# Altium footprint library Connectors.PcbLib: 113 footprints (part 6 of 8)
Each footprint in its own frame and in the unit in brackets; x right, y up, seen from the top. Pads: shape width x height; smd on the part's side, far side on the other; paste and mask are expansions set on the pad; w line width, h text height; cw(c..) or ccw(c..) is an arc to the next point about the centre after c.
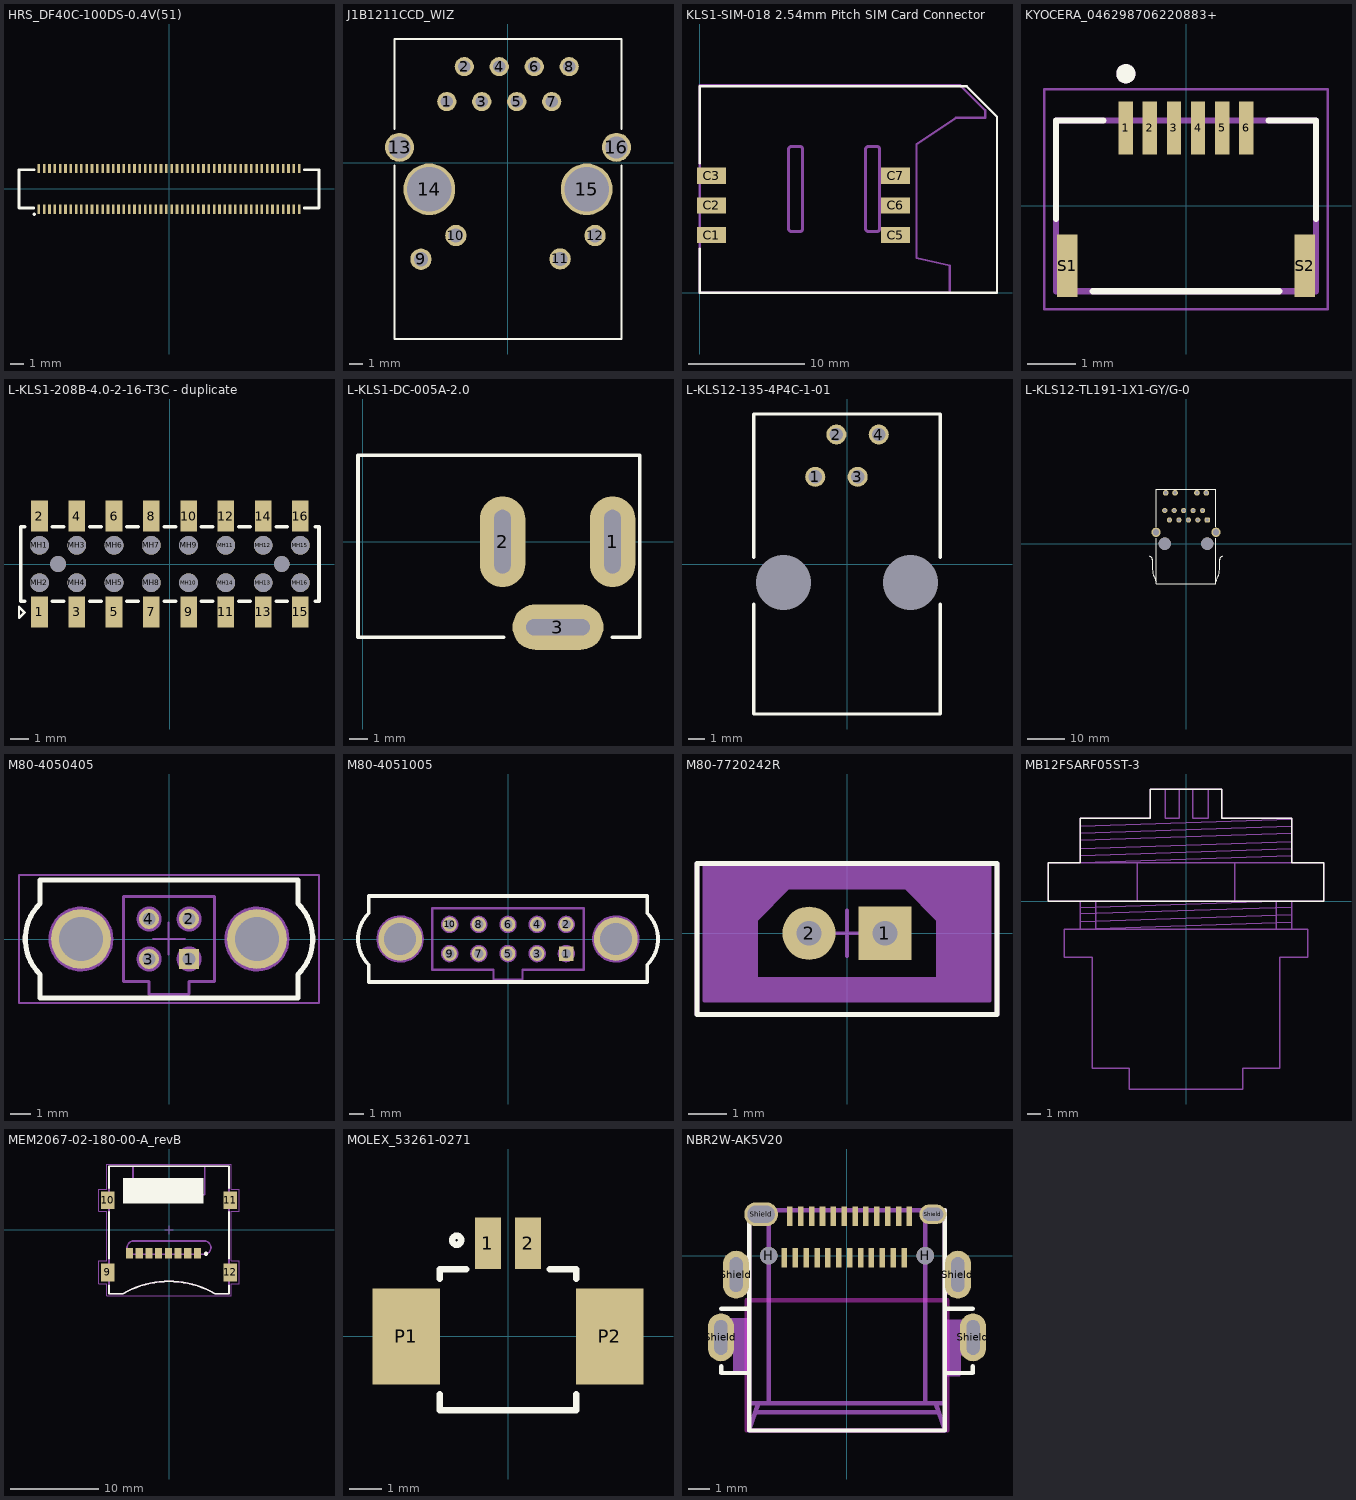
[diagram p5: the footprints below, top view; thin cyan lines are the x and y axes]

## HRS_DF40C-100DS-0.4V(51) [mm]
pads (100):
  rect 0.2x0.7 smd: 1(-9.8,-1.54) 2(-9.8,1.54) 3(-9.4,-1.54) 4(-9.4,1.54) 5(-9,-1.54) 6(-9,1.54) 7(-8.6,-1.54) 8(-8.6,1.54) 9(-8.2,-1.54) 10(-8.2,1.54) 11(-7.8,-1.54) 12(-7.8,1.54) 13(-7.4,-1.54) 14(-7.4,1.54) 15(-7,-1.54) 16(-7,1.54) 17(-6.6,-1.54) 18(-6.6,1.54) 19(-6.2,-1.54) 20(-6.2,1.54) 21(-5.8,-1.54) 22(-5.8,1.54) 23(-5.4,-1.54) 24(-5.4,1.54) 25(-5,-1.54) 26(-5,1.54) 27(-4.6,-1.54) 28(-4.6,1.54) 29(-4.2,-1.54) 30(-4.2,1.54) 31(-3.8,-1.54) 32(-3.8,1.54) 33(-3.4,-1.54) 34(-3.4,1.54) 35(-3,-1.54) 36(-3,1.54) 37(-2.6,-1.54) 38(-2.6,1.54) 39(-2.2,-1.54) 40(-2.2,1.54) 41(-1.8,-1.54) 42(-1.8,1.54) 43(-1.4,-1.54) 44(-1.4,1.54) 45(-1,-1.54) 46(-1,1.54) 47(-0.6,-1.54) 48(-0.6,1.54) 49(-0.2,-1.54) 50(-0.2,1.54) 51(0.2,-1.54) 52(0.2,1.54) 53(0.6,-1.54) 54(0.6,1.54) 55(1,-1.54) 56(1,1.54) 57(1.4,-1.54) 58(1.4,1.54) 59(1.8,-1.54) 60(1.8,1.54) 61(2.2,-1.54) 62(2.2,1.54) 63(2.6,-1.54) 64(2.6,1.54) 65(3,-1.54) 66(3,1.54) 67(3.4,-1.54) 68(3.4,1.54) 69(3.8,-1.54) 70(3.8,1.54) 71(4.2,-1.54) 72(4.2,1.54) 73(4.6,-1.54) 74(4.6,1.54) 75(5,-1.54) 76(5,1.54) 77(5.4,-1.54) 78(5.4,1.54) 79(5.8,-1.54) 80(5.8,1.54) 81(6.2,-1.54) 82(6.2,1.54) 83(6.6,-1.54) 84(6.6,1.54) 85(7,-1.54) 86(7,1.54) 87(7.4,-1.54) 88(7.4,1.54) 89(7.8,-1.54) 90(7.8,1.54) 91(8.2,-1.54) 92(8.2,1.54) 93(8.6,-1.54) 94(8.6,1.54) 95(9,-1.54) 96(9,1.54) 97(9.4,-1.54) 98(9.4,1.54) 99(9.8,-1.54) 100(9.8,1.54)
Top Overlay:
  lines w0.2: -10.2,-1.44 -11.3,-1.44 -11.3,1.44 -10.16,1.44 ; 10.2,-1.44 11.3,-1.44 11.3,1.44 10.2,1.44
  lines w0.25: -10.16,-1.905 -10.149,-1.905 -10.149,-1.911
3D body "DF40C-100DS-0.4V(51).STEP": height 1.61, standoff -0.04, extent -11.3,-1.69 11.3,1.69

## J1B1211CCD_WIZ [mil]
pads (16):
  round 55 hole 35 mask+0: 1(-175,175.39) 2(-125,275.39) 3(-75,175.39) 4(-25,275.39) 5(25,175.39) 6(75,275.39) 7(125,175.39) 8(175,275.39)
  round 61 hole 41: 9(-249.02,-275.39) 10(-149.02,-207.68) 11(149.02,-274.61) 12(249.02,-207.68)
  round 83 hole 63: 13(-310.04,44.69) 16(310.04,44.69)
  round 148 hole 128: 14(-225,-75.39) 15(225,-75.39)
Top Overlay:
  lines w6: -325,-7.83 -325,-503.61 325,-503.61 325,-7.83 ; -325,97.2 -325,278.18 ; -325,277.9 -325,354.39 325,354.39 325,277.9 ; 325,97.2 325,279.18
3D body "J1B1211CCD.step": height 565.83, standoff -155.01, extent -354.7,-496.07 354.7,342.52

## KLS1-SIM-018 2.54mm Pitch SIM Card Connector [mm]
pads (6):
  rect 2.5x1.4 smd: C1(1.025,4.95) C2(1.025,7.49) C3(1.025,10.03) C5(16.8,4.95) C6(16.8,7.49) C7(16.8,10.03)
Top Overlay:
  lines w0.2: 0,3.8 0,0 25.5,0 25.5,15.1 22.9,17.7 0,17.7 0,11.1
Top Assembly:
  lines w0.2: 21.45,0 21.45,2.344 18.594,2.989 18.594,12.718 21.95,15 23.86,15 24.5,15 24.5,15.64 22.34,17.8 0,17.8 0,0 21.45,0 ; 21.45,0 21.45,0
  lines w0.254: 7.627,5.504 ccw(c7.881,5.504) 7.881,5.25 8.582,5.25 ccw(c8.582,5.504) 8.836,5.504 8.836,12.296 ccw(c8.582,12.296) 8.582,12.55 7.881,12.55 ccw(c7.881,12.296) 7.627,12.296 7.627,5.504 ; 14.231,5.504 ccw(c14.485,5.504) 14.485,5.25 15.186,5.25 ccw(c15.186,5.504) 15.44,5.504 15.44,12.296 ccw(c15.186,12.296) 15.186,12.55 14.485,12.55 ccw(c14.485,12.296) 14.231,12.296 14.231,5.504
  text ".Designator" at 11.492,16.618 h1.52
3D body "115G-AAAA-R_C_6.stp": height 1.81, standoff 0.01, extent 0,0 24.5,17.8

## KYOCERA_046298706220883+ [mm]
height 3.2
pads (8):
  rect 0.3x1.1 smd mask+0.05: 1(-1.25,1.625) 2(-0.75,1.625) 3(-0.25,1.625) 4(0.25,1.625) 5(0.75,1.625) 6(1.25,1.625)
  rect 0.42x1.3 smd mask+0.05: S1(-2.47,-1.245) S2(2.47,-1.245)
Top Overlay:
  circle w0.2: c-1.25,2.75 r0.1
  lines w0.127: -2.7,-0.275 -2.7,1.775 -1.72,1.775 ; -1.94,-1.775 1.94,-1.775 ; 1.72,1.775 2.7,1.775 2.7,-0.275
Top Assembly:
  circle w0.2: c-1.25,2.75 r0.1
  lines w0.127: -2.7,-1.775 -2.7,1.775 2.7,1.775 2.7,-1.775 -2.7,-1.775
Mechanical 15:
  lines w0.05: -2.95,-2.145 -2.95,2.425 2.95,2.425 2.95,-2.145 -2.95,-2.145
3D body "006298706200.stp": height 0.95, standoff 0.01, extent -2.7,-1.925 2.7,1.775

## L-KLS1-208B-4.0-2-16-T3C - duplicate [mm]
pads (34):
  rect 0.89x1.65 smd: 1(-7,-2.575) 2(-7,2.575) 3(-5,-2.575) 4(-5,2.575) 5(-3,-2.575) 6(-3,2.575) 7(-1,-2.575) 8(-1,2.575) 9(1,-2.575) 10(1,2.575) 11(3,-2.575) 12(3,2.575) 13(5,-2.575) 14(5,2.575) 15(7,-2.575) 16(7,2.575)
  round 1 hole 1 unplated: MH1(-7,1) MH2(-7,-1) MH3(-5,1) MH4(-5,-1) MH5(-3,-1) MH6(-3,1) MH7(-1,1) MH8(-1,-1) MH9(1,1) MH10(1,-1) MH11(3,1) MH12(5,1) MH13(5,-1) MH14(3,-1) MH15(7,1) MH16(7,-1)
  round 0.85 hole 0.85 unplated: MH17(-6,0) MH17(6,0)
Top Overlay:
  lines w0.127: -8.1,-2.9 -8.1,-2.3 -7.8,-2.6 -8.1,-2.9
  lines w0.2: -7.8,-2 -8,-2 -8,2 -7.8,2 ; -6.3,-2 -5.7,-2 ; -6.3,2 -5.7,2 ; -4.3,-2 -3.7,-2 ; -4.3,2 -3.7,2 ; -2.3,-2 -1.7,-2 ; -2.3,2 -1.7,2 ; -0.3,-2 0.3,-2 ; -0.3,2 0.3,2 ; 1.7,-2 2.3,-2 ; 1.7,2 2.3,2 ; 3.7,-2 4.3,-2 ; 3.7,2 4.3,2 ; 5.7,-2 6.3,-2 ; 5.7,2 6.3,2 ; 7.8,-2 8,-2 8,2 7.8,2
3D body "621016242921(2x8_Socket).stp": height 5.47, standoff 0.01, extent -8.25,-3.1 8.25,3.1

## L-KLS1-DC-005A-2.0 [mm]
height 14.5
pads (3):
  oval 2.5x5 hole 0.9 slot 3.5 at 90 deg: 1(13.75,0) 2(7.7,0)
  oval 5x2.5 hole 3.5 slot 0.9 at 90 deg: 3(10.75,-4.7)
Top Overlay:
  lines w0.2: 7.75,-5.25 -0.25,-5.25 -0.25,-5 -0.25,4.75 15.25,4.75 15.25,-5.25 13.75,-5.25
3D body "694106301002.stp": height 10.71, standoff -3.79, extent 0,-5 14.5,4.5

## L-KLS12-135-4P4C-1-01 [mm]
height 11
pads (6):
  round 1.2 hole 0.8: 1(-1.905,5.23) 2(-0.635,7.77) 3(0.635,5.23) 4(1.905,7.77)
  round 0 hole 3.3: 5(-3.81,-1.12) 6(3.81,-1.12)
Top Overlay:
  lines w0.2: -5.6,-2.4 -5.6,-9 5.6,-9 5.6,-2.4 ; -5.6,0.4 -5.6,9 5.6,9 5.6,0.4
3D body "L-KLS12-135-4P4C-1-01 v1.step": height 11.71, standoff -3.39, extent -5.59,-9 5.59,9

## L-KLS12-TL191-1X1-GY/G-0 [mm] "LAN Transformer, body 21.3x16mm"
height 13.55
pads (18):
  rrect50% 1.4x1.4 hole 0.9: 1(5.715,6.35)
  round 1.4 hole 0.9: 2(4.445,8.89) 3(3.175,6.35) 4(1.905,8.89) 5(0.635,6.35) 6(-0.635,8.89) 7(-1.905,6.35) 8(-3.175,8.89) 9(-4.445,6.35) 10(-5.715,8.89)
  round 1.52 hole 0.9: 11(5.45,13.64) 12(2.95,13.64) 13(-2.95,13.64) 14(-5.45,13.64)
  round 3.3 hole 3.3 unplated: MH1(-5.715,0) MH2(5.715,0)
  round 2.5 hole 1.7: Shell(-8.05,3.05) Shell(8.05,3.05)
Top Overlay:
  lines w0.2: -9.683,-3.431 cw(c-9.9,-4.3) -9.004,-4.3 ; -9.013,-4.172 ccw(c-5.398,-4.612) -9.04,-4.642 ccw(c15.624,-5.47) -8.969,-7.514 ccw(c-0.55,-5.995) -8,-10.2 ; -8,1.5 -8,-10.74 8,-10.74 8,1.5 ; -8,4.6 -8,14.56 8,14.56 8,4.6 ; 8,-10.2 ccw(c0.55,-5.995) 8.969,-7.514 ccw(c-15.624,-5.47) 9.04,-4.642 ccw(c5.398,-4.612) 9.013,-4.172 ; 9.004,-4.3 cw(c9.9,-4.3) 9.683,-3.431
3D body "7499110124 (rev1).stp": height 13.51, standoff -3.54, extent -8.2,-10.85 8.2,14.45

## M80-4050405 [mm]
pads (6):
  rect 1x1 hole 0.65: 1(1,-1)
  round 1 hole 0.65: 2(1,1) 3(-1,-1) 4(-1,1)
  round 3 hole 2.2 paste-2539.97: ""(-4.4,0) ""(4.4,0)
Top Overlay:
  lines w0.254: -6.45,-2.95 6.45,-2.95 6.45,-1.771 ccw(c4.7,0) 6.45,1.771 6.45,2.95 -6.45,2.95 -6.45,1.771 ccw(c-4.7,0) -6.45,-1.771 -6.45,-2.95
Top Assembly:
  circle w0.254: c1,-1 r0.5
  circle w0.254: c1,1 r0.5
  circle w0.254: c-1,-1 r0.5
  circle w0.254: c-1,1 r0.5
  circle w0.254: c-4.4,0 r1.5
  circle w0.254: c4.4,0 r1.5
  lines w0.15: -6.45,-2.95 6.45,-2.95 6.45,-1.771 ccw(c4.7,0) 6.45,1.771 6.45,2.95 -6.45,2.95 -6.45,1.771 ccw(c-4.7,0) -6.45,-1.771 -6.45,-2.95 ; -2.27,-2.115 -1,-2.115 -1,-2.775 0.975,-2.775 1,-2.75 1,-2.115 2.27,-2.115 2.27,2.115 -2.27,2.115 -2.27,-2.115
  text ".Designator" at -4.998,3.567 h1
Mechanical 15:
  lines w0.1: -0.8,0 0.8,0 ; -0.013,-0.78 -0.013,0.82 ; -7.5,-3.2 7.5,-3.2 7.5,3.2 -7.5,3.2 -7.5,-3.2
3D body "m80-4050405_asm.stp": height 5.65, standoff -4.63, extent -6.99,-2.775 6.99,2.775

## M80-4051005 [mm]
pads (12):
  rect 1x1 hole 0.65: 1(4,-1)
  round 1 hole 0.65: 2(4,1) 3(2,-1) 4(2,1) 5(0,-1) 6(0,1) 7(-2,-1) 8(-2,1) 9(-4,-1) 10(-4,1)
  round 3 hole 2.2 paste-2539.97: ""(-7.4,0) ""(7.4,0)
Top Overlay:
  lines w0.254: -9.55,-2.95 9.55,-2.95 9.55,-1.771 ccw(c7.8,0) 9.55,1.771 9.55,2.95 -9.55,2.95 -9.55,1.771 ccw(c-7.8,0) -9.55,-1.771 -9.55,-2.95
Top Assembly:
  circle w0.254: c-7.4,0 r1.5
  circle w0.254: c7.4,0 r1.5
  circle w0.2: c4,-1 r0.5
  circle w0.2: c2,-1 r0.5
  circle w0.2: c0,-1 r0.5
  circle w0.2: c-2,-1 r0.5
  circle w0.2: c-4,-1 r0.5
  circle w0.2: c-4,1 r0.5
  circle w0.2: c-2,1 r0.5
  circle w0.2: c0,1 r0.5
  circle w0.2: c4,1 r0.5
  circle w0.2: c2,1 r0.5
  lines w0.15: -9.55,-2.95 9.55,-2.95 9.55,-1.771 ccw(c7.8,0) 9.55,1.771 9.55,2.95 -9.55,2.95 -9.55,1.771 ccw(c-7.8,0) -9.55,-1.771 -9.55,-2.95 ; -5.2,-2.115 -1,-2.115 -1,-2.775 0.975,-2.775 1,-2.75 1,-2.115 5.2,-2.115 5.2,2.115 -5.2,2.115 -5.2,-2.115
  text ".Designator" at -4.998,3.367 h1
3D body "m80-4051005_asm.stp": height 5.65, standoff -4.63, extent -9.99,-2.775 9.99,2.775

## M80-7720242R [mm]
height 8.4
pads (2):
  rect 1.4x1.4 / inner round 1.4 / far side rect 1.4x1.4 hole 0.65: 1(1,0)
  round 1.4 hole 0.65: 2(-1,0)
Top Overlay:
  lines w0.127: -3.95,-2.14 3.95,-2.14 3.95,1.84 -3.95,1.84 -3.95,-2.14
Top Assembly:
  circle w0.5: c-1,0 r0.2
  circle w0.5: c1,0 r0.2
  region: -3.75,-1.775 3.75,-1.775 3.75,-1.2 -3.75,-1.2
  region: -2.4,-1.5 -2.4,0.35 -1.495,1.255 -1.495,1.775 -3.75,1.775 -3.75,-1.488 -2.4,-1.488
  region: -1.495,1.255 -1.44,1.2 1.55,1.2 2.4,0.35 2.4,-1.2 3.75,-1.2 3.75,1.775 -1.495,1.775
  lines w0.1: -3.75,-1.2 -3.75,-1.775 ; -3.75,-1.775 3.75,-1.775 3.75,1.775 -3.75,1.775 -3.75,-1.775 ; -2.4,-1.2 -2.4,0.35 -1.55,1.2 1.55,1.2 2.4,0.35 2.4,-1.2 -2.4,-1.2
  text ".Designator" at -5.168,2.367 h1
Mechanical 15:
  lines w0.1: -0.8,0 0.8,0 ; 0,-0.6 0,0.6
  lines w0.127: -3.95,-2.14 3.95,-2.14 3.95,1.84 -3.95,1.84 -3.95,-2.14
3D body "M80-7720242R.step": height 8.35, standoff -2, extent -3.95,-2.075 3.95,1.775

## MB12FSARF05ST-3 [mm]
Top Overlay:
  lines w0.1: -9.9,0 -6.5,0 6.5,0 9.9,0 9.9,2.8 7.6,2.8 7.6,6 2.568,6 2.568,6.9 2.568,8.1 0,8.1 -2.568,8.1 -2.568,6.9 -2.568,6 -7.6,6 -7.6,2.8 -9.9,2.8 -9.9,0
Top Assembly:
  lines w0.1: -7.6,-1.45 7.6,-0.947 ; -7.6,-0.45 7.6,0.053 ; -7.6,3.303 7.6,3.805 ; -7.6,3.805 7.6,4.308 ; -7.6,4.4 7.6,4.903 ; -7.6,4.903 7.6,5.405 ; -7.6,5.405 7.6,5.908 ; -6.5,0 -9.9,0 -9.9,2.8 -7.6,2.8 ; -3.513,0 -3.508,0 -3.508,2.8 ; 3.508,0 3.508,2.8 ; 6.5,0 9.9,0 9.9,2.8 7.6,2.8 ; 7.6,-2 7.6,0 -7.6,0 -7.6,-0.9 ; 7.6,-1.497 -7.6,-2 ; 7.6,-0.397 -7.6,-0.9 ; 7.6,3.303 -7.6,2.8 ; -7.6,-2 -6.5,-2 ; -7.6,-2 -7.6,-0.9 ; -7.6,2.8 7.6,2.8 ; -7.6,2.8 -7.6,6 -2.568,6 -2.568,6.9 -2.568,8.1 -1.5,8.1 -1.5,6 -0.5,6 -0.5,8.1 0.5,8.1 0.5,6 1.606,6 1.606,8.1 2.568,8.1 2.568,6.9 2.568,6 7.6,6 7.6,2.8 ; -6.5,-2 6.5,-2 8.755,-2 8.755,-4 6.75,-4 6.75,-12 4.1,-12 4.1,-13.5 0,-13.5 -4.1,-13.5 -4.1,-12 -6.75,-12 -6.75,-4 -8.755,-4 -8.755,-2 -6.5,-2 ; -6.5,-2 -6.5,-2
  text ".Designator" at -4.998,-3.133 h1
Mechanical 15:
  lines w0.1: -6.5,-2 -8.755,-2 -8.755,-4 -6.75,-4 -6.75,-12 -4.1,-12 -4.1,-13.5 0,-13.5 4.1,-13.5 4.1,-12 6.75,-12 6.75,-4 8.755,-4 8.755,-2 6.5,-2 ; -6.5,-2 -6.5,-2 ; -6.5,-2 -6.5,0 -9.9,0 -9.9,2.8 -7.6,2.8 -7.6,6 -2.568,6 -2.568,6.9 -2.568,8.1 0,8.1 2.568,8.1 2.568,6.9 2.568,6 7.6,6 7.6,2.8 9.9,2.8 9.9,0 6.5,0 6.5,-2 ; 6.5,-2 6.5,-2
3D body "3D P249_2 MB12FSARHD05ST.STEP": height 9, standoff -9, extent -9.895,-13.5 9.895,8.1

## MEM2067-02-180-00-A_revB [mm] "Micro SD Memory Card ConnectorSMT, Hinged, 1.80mm Profile"
height 1.8
pads (12):
  rect 0.8x1.2 smd: 1(3.225,-2.625) 2(2.125,-2.625) 3(1.025,-2.625) 4(-0.075,-2.625) 5(-1.175,-2.625) 6(-2.275,-2.625) 7(-3.375,-2.625) 8(-4.475,-2.625)
  rect 1.5x2 smd: 9(-6.945,-4.825) 10(-6.945,3.375) 11(6.945,3.375) 12(6.945,-4.825)
Top Overlay:
  circle w0.254: c4.2,-2.7 r0.112
  rectangle: -5.2,3 3.9,5.9
  lines w0.2: -6.8,-6.275 -6.8,-7.225 -5.25,-7.225 ; -6.8,-3.225 -6.8,2.025 ; -6.8,4.725 -6.8,7.225 6.8,7.225 6.8,4.725 ; -5.2,-7.225 cw(c0,-16.181) 5.2,-7.225 ; 5.25,-7.225 6.8,-7.225 6.8,-6.275 ; 6.8,-3.225 6.8,2.025
Top Assembly:
  rectangle: 6.8,2.775 7.3,3.975
  rectangle: 6.8,-5.425 7.3,-4.225
  rectangle: -7.3,-5.425 -6.8,-4.225
  rectangle: -7.3,2.775 -6.8,3.975
  lines w0.1: -6.8,-5.425 -7.3,-5.425 -7.3,-4.225 -6.8,-4.225 ; -6.8,2.775 -7.3,2.775 -7.3,3.975 -6.8,3.975 ; -6.8,7.225 6.8,7.225 ; 6.8,-5.425 7.3,-5.425 7.3,-4.225 6.8,-4.225 ; 6.8,2.775 7.3,2.775 7.3,3.975 6.8,3.975
  lines w0.2: -5.25,-7.225 -6.8,-7.225 -6.8,7.225 6.8,7.225 6.8,-7.225 5.25,-7.225 ; -5.2,-7.225 cw(c0,-16.181) 5.2,-7.225 ; -4.083,7.225 -4.083,4 4.04,4 4.04,7.225 ; -4,-2.75 cw(c-4,-2) -4,-1.25 4,-1.25 cw(c4,-2) 4,-2.75 -4,-2.75
  text ".Designator" at -7.618,-0.508 h1.52
Mechanical 15:
  lines w0.05: -7.95,-6.1 -7.95,-3.5 -7.05,-3.5 -7.05,2.1 -7.95,2.1 -7.95,4.6 -7.05,4.6 -7.05,7.475 7.05,7.475 7.05,4.6 7.95,4.6 7.95,2.1 7.05,2.1 7.05,-3.5 7.95,-3.5 7.95,-6.1 7.05,-6.1 7.05,-7.475 -7.05,-7.475 -7.05,-6.1 -7.95,-6.1
  lines w0.1: -0.5,0 0.5,0 ; 0,-0.5 0,0.5
3D body "mem2067-02-180-00-a_revb.step": height 1.84, standoff -0.03, extent -7.305,-7.225 7.32,7.225

## MOLEX_53261-0271 [mm]
pads (4):
  rect 0.8x1.6 smd: 1(-0.625,2.9) 2(0.625,2.9)
  rect 2.1x3 smd: P1(-3.175,0) P2(3.175,0)
Top Overlay:
  circle w0.2: c-1.6,3 r0.141
  lines w0.2: -2.125,-1.8 -2.125,-2.3 2.125,-2.3 2.125,-1.8 ; -2.125,1.8 -2.125,2.1 -1.3,2.1 ; 1.3,2.1 2.125,2.1 2.125,1.8
3D body "532610271.stp": height 3.41, standoff 0.01, extent -3.825,-2.175 3.825,3.025

## NBR2W-AK5V20 [mm]
pads (32):
  rect 0.254x0.9 smd: A1(-2.625,1.8) A2(-2.125,1.8) A3(-1.625,1.8) A4(-1.125,1.8) A5(-0.625,1.8) A6(-0.125,1.8) A7(0.375,1.8) A8(0.875,1.8) A9(1.375,1.8) A10(1.875,1.8) A11(2.375,1.8) A12(2.875,1.8) B1(2.625,-0.1) B2(2.125,-0.1) B3(1.625,-0.1) B4(1.125,-0.1) B5(0.625,-0.1) B6(0.125,-0.1) B7(-0.375,-0.1) B8(-0.875,-0.1) B9(-1.375,-0.1) B10(-1.875,-0.1) B11(-2.375,-0.1) B12(-2.875,-0.1)
  round 0.8 hole 0.8: H(-3.6,0) H(3.6,0)
  oval 1.2x2.2 hole 0.6 slot 1.6 at 90 deg: Shield(-5.798,-3.765) Shield(-5.098,-0.875) Shield(5.102,-0.875) Shield(5.802,-3.765)
  oval 1.55x1.1 hole 0.8 slot 1.25 at 0 deg: Shield(-3.948,1.9)
  oval 1.25x0.9 hole 0.6 slot 0.95 at 0 deg: Shield(3.952,1.9)
Top Overlay:
  lines w0.2: -5.786,-5.089 -5.786,-5.403 -4.51,-5.403 ; -5.786,-2.45 -4.5,-2.45 ; -4.498,2.09 -4.498,-8.05 4.502,-8.05 4.502,2.09 ; 4.504,-2.45 5.79,-2.45 ; 4.514,-5.403 5.79,-5.403 5.79,-5.089
Keep-Out Layer:
  lines w0.2: -4.623,-8.05 4.627,-8.05 4.627,-2.05 -4.623,-2.05 -4.623,-8.05
Top Assembly:
  rectangle: -5.798,-4.368 -4.498,-2.98
  rectangle: -5.148,-5.403 -4.498,-4.091
  rectangle: -5.117,-1.637 -4.5,-0.113
  region: 5.78,-2.98 4.48,-2.98 4.48,-4.487 5.78,-4.487
  region: 5.13,-4.091 4.48,-4.091 4.48,-5.465 5.13,-5.465
  region: 5.099,-0.113 4.482,-0.113 4.482,-1.637 5.099,-1.637
  lines w0.2: -5.148,-4.425 -5.148,-5.403 -4.51,-5.403 ; -4.623,-4.425 -5.798,-4.425 -5.798,-2.98 -4.498,-2.98 ; -4.498,-1.637 -5.098,-1.637 -5.098,-0.875 -5.098,-0.113 -4.498,-0.113 ; -4.486,2.09 -4.5,2.09 ; -4.216,-7.209 4.181,-7.209 ; -4.078,-6.8 -4.498,-8.05 4.502,-8.05 4.082,-6.8 ; -3.6,-6.8 -3.6,2.09 ; 3.6,-6.8 3.6,2.09 ; 4.502,-5.465 5.152,-5.465 5.152,-4.487 ; 4.502,-4.487 5.802,-4.487 5.802,-3.042 4.502,-3.042 ; 4.502,-1.699 5.102,-1.699 5.102,-0.937 5.102,-0.176 4.502,-0.176 ; -4.5,2.09 4.5,2.09 4.5,-6.8 -4.5,-6.8 -4.5,2.09
  text ".Designator" at -4.999,-1.459 h1
3D body "102200800042_00_2-K80 USB Type C 3.1 SMT NBR2W-AK5V20.stp": height 2.89, standoff -1.69, extent -5.9,-8.05 5.9,2.09

## PCBComponent_1 [mm]
3D body "M80-5620405.step": height 11, standoff 1.9, extent -2.75,-7.065 3.3,6.915